# Altium footprint library laboE_altium.PcbLib: 676 footprints (part 26 of 43)
Each footprint in its own frame and in the unit in brackets; x right, y up, seen from the top. Pads: shape width x height; smd on the part's side, far side on the other; paste and mask are expansions set on the pad; w line width, h text height; cw(c..) or ccw(c..) is an arc to the next point about the centre after c.
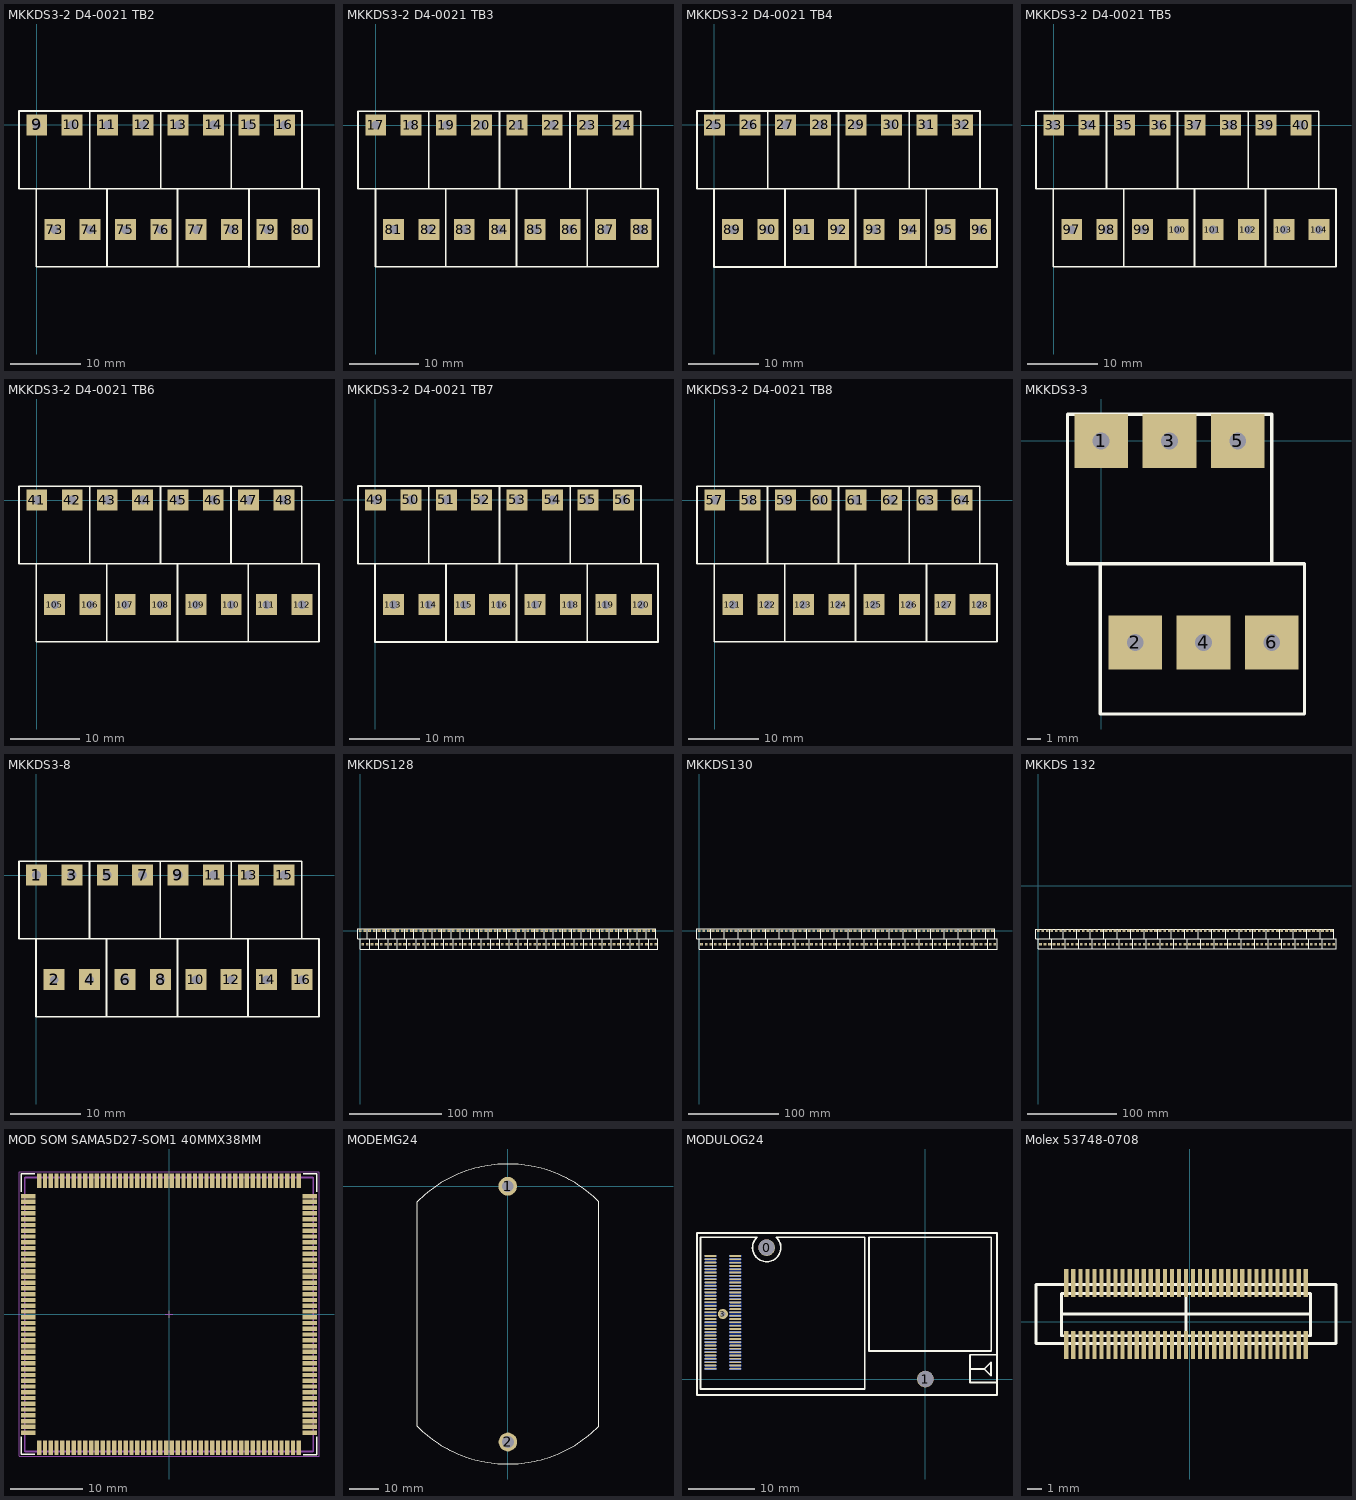
[diagram p25: the footprints below, top view; thin cyan lines are the x and y axes]

## MKKDS3-2 D4-0021 TB2 [mm]
pads (16):
  rect 3x3 hole 1.25: 9(0,0) 10(5.04,0) 11(10.12,0) 12(15.2,0) 13(20.24,0) 14(25.32,0) 15(30.4,0) 16(35.44,0) 73(2.58,-15) 74(7.62,-15) 75(12.7,-15) 76(17.78,-15) 77(22.82,-15) 78(27.9,-15) 79(32.98,-15) 80(37.966,-14.986)
Top Overlay:
  lines w0.254: -0.073,-9.144 -0.073,-20.32 20.167,-20.32 ; 7.58,-9.144 7.58,1.98 ; 10.047,-20.32 10.047,-9.144 ; 27.86,1.98 27.86,-9.144 40.407,-9.144 40.407,-20.32 35.367,-20.32 20.167,-20.32 ; 30.381,-20.334 30.381,-9.158 ; 32.94,-9.144 37.98,-9.144 37.98,1.98 32.94,1.98 17.74,1.98 ; 35.367,-9.144 17.74,-9.144 17.74,1.98 ; 17.74,1.98 -2.54,1.98 -2.54,-9.144 20.167,-9.144 20.167,-20.32

## MKKDS3-2 D4-0021 TB3 [mm]
pads (16):
  rect 3x3 hole 1.25: 17(0,0) 18(5.08,0) 19(10.12,0) 20(15.2,0) 21(20.28,0) 22(25.32,0) 23(30.4,0) 24(35.48,0) 81(2.58,-15) 82(7.66,-15) 83(12.7,-15) 84(17.78,-15) 85(22.86,-15) 86(27.9,-15) 87(32.98,-15) 88(38.06,-15)
Top Overlay:
  lines w0.254: -0.019,-9.158 -0.019,-20.334 10.047,-20.32 ; 10.047,-9.144 10.047,-20.32 ; 17.74,-9.144 17.74,1.98 -2.54,1.98 -2.54,-9.144 20.167,-9.144 ; 20.207,-20.32 20.207,-9.144 ; 22.82,-9.144 40.447,-9.144 ; 25.247,-9.144 7.62,-9.144 7.62,1.98 22.82,1.98 38.02,1.98 38.02,-9.144 ; 27.86,-9.144 27.86,1.98 ; 30.327,-20.32 30.327,-9.144 ; 40.447,-20.32 25.247,-20.32 10.047,-20.32 ; 40.487,-20.32 40.487,-9.144

## MKKDS3-2 D4-0021 TB4 [mm]
pads (16):
  rect 3x3 hole 1.25: 25(0,0) 26(5.08,0) 27(10.16,0) 28(15.2,0) 29(20.28,0) 30(25.36,0) 31(30.4,0) 32(35.48,0) 89(2.58,-15) 90(7.66,-15) 91(12.74,-15) 92(17.78,-15) 93(22.86,-15) 94(27.94,-15) 95(32.98,-15) 96(38.06,-15)
Top Overlay:
  lines w0.254: -0.073,-9.144 -0.073,-20.32 15.127,-20.32 30.327,-20.32 ; 7.62,-9.144 7.62,1.98 ; 10.087,-20.32 10.087,-9.144 ; 12.7,-9.144 30.327,-9.144 ; 15.127,-9.144 -2.5,-9.144 -2.5,1.98 12.7,1.98 27.9,1.98 ; 17.74,-9.144 17.74,1.98 ; 20.207,-20.32 20.207,-9.144 ; 38.02,-9.144 38.02,1.98 27.9,1.98 ; 27.9,-9.144 27.9,1.98 ; 27.9,-9.144 40.447,-9.144 40.447,-20.32 30.327,-20.32 ; 27.9,-9.144 27.9,1.98 ; 30.327,-20.32 30.327,-9.144 ; 30.327,-20.32 30.327,-9.144

## MKKDS3-2 D4-0021 TB5 [mm]
pads (16):
  rect 3x3 hole 1.25: 33(0,0) 34(5.04,0) 35(10.12,0) 36(15.2,0) 37(20.24,0) 38(25.32,0) 39(30.4,0) 40(35.44,0) 97(2.58,-15) 98(7.62,-15) 99(12.7,-15) 100(17.78,-15) 101(22.82,-15) 102(27.9,-15) 103(32.98,-15) 104(38.02,-15)
Top Overlay:
  lines w0.254: -0.073,-9.144 -0.073,-20.32 20.167,-20.32 ; 7.58,-9.144 7.58,1.98 ; 10.047,-20.32 10.047,-9.144 ; 27.86,-9.144 27.86,1.98 ; 30.327,-20.32 30.327,-9.144 ; 37.98,-9.144 37.98,1.98 17.74,1.98 ; 17.74,1.98 17.74,-9.144 40.447,-9.144 40.447,-20.32 20.167,-20.32 ; 17.74,1.98 -2.54,1.98 -2.54,-9.144 20.167,-9.144 20.167,-20.32

## MKKDS3-2 D4-0021 TB6 [mm]
pads (16):
  rect 3x3 hole 1.25: 41(0,0) 42(5.092,0) 43(10.12,0) 44(15.2,0) 45(20.28,0) 46(25.32,0) 47(30.4,0) 48(35.48,0) 105(2.58,-15) 106(7.66,-15) 107(12.7,-15) 108(17.78,-15) 109(22.86,-15) 110(27.9,-15) 111(32.98,-15) 112(38.06,-15)
Top Overlay:
  lines w0.254: -0.073,-9.144 -0.073,-20.32 20.167,-20.32 ; 17.74,-9.144 17.74,1.98 -2.54,1.98 -2.54,-9.144 20.167,-9.144 ; 20.207,-20.32 20.207,-9.144 ; 22.82,-9.144 40.447,-9.144 ; 25.247,-9.144 7.62,-9.144 ; 27.86,-9.144 27.86,1.98 ; 30.327,-20.32 30.327,-9.144 ; 38.02,-9.144 38.02,1.98 22.82,1.98 7.62,1.98 ; 40.447,-20.32 25.247,-20.32 10.047,-20.32 ; 40.487,-20.32 40.487,-9.144 ; 7.62,-9.144 7.62,1.98 ; 7.62,-9.144 7.62,1.98 ; 10.047,-20.32 10.047,-9.144 10.047,-20.32

## MKKDS3-2 D4-0021 TB7 [mm]
pads (16):
  rect 3x3 hole 1.25: 49(0,0) 50(5.08,0) 51(10.16,0) 52(15.2,0) 53(20.28,0) 54(25.36,0) 55(30.4,0) 56(35.48,0) 113(2.58,-15) 114(7.66,-15) 115(12.74,-15) 116(17.78,-15) 117(22.86,-15) 118(27.94,-15) 119(32.98,-15) 120(38.06,-15)
Top Overlay:
  lines w0.254: -0.073,-9.144 -0.073,-20.32 15.127,-20.32 30.327,-20.32 ; 7.62,-9.144 7.62,1.98 ; 10.087,-20.32 10.087,-9.144 ; 12.7,-9.144 30.327,-9.144 ; 15.127,-9.144 -2.5,-9.144 -2.5,1.98 27.9,1.98 ; 17.74,-9.144 17.74,1.98 ; 20.207,-20.32 20.207,-9.144 ; 38.02,-9.144 38.02,1.98 27.9,1.98 ; 27.9,-9.144 27.9,1.98 ; 27.9,-9.144 40.447,-9.144 40.447,-20.32 30.327,-20.32 ; 27.9,-9.144 27.9,1.98 ; 30.327,-20.32 30.327,-9.144 ; 30.327,-20.32 30.327,-9.144

## MKKDS3-2 D4-0021 TB8 [mm]
pads (16):
  rect 3x3 hole 1.25: 57(0,0) 58(5.04,0) 59(10.12,0) 60(15.2,0) 61(20.24,0) 62(25.32,0) 63(30.4,0) 64(35.44,0) 121(2.58,-15) 122(7.62,-15) 123(12.7,-15) 124(17.78,-15) 125(22.82,-15) 126(27.9,-15) 127(32.98,-15) 128(38.02,-15)
Top Overlay:
  lines w0.254: -0.073,-9.144 -0.073,-20.32 20.167,-20.32 ; 7.58,-9.144 7.58,1.98 ; 10.047,-20.32 10.047,-9.144 ; 27.86,-9.144 27.86,1.98 ; 30.327,-20.32 30.327,-9.144 ; 32.94,-9.144 40.447,-9.144 40.447,-20.32 20.167,-20.32 ; 35.367,-9.144 17.74,-9.144 17.74,1.98 ; 37.98,-9.144 37.98,1.98 32.94,1.98 17.74,1.98 ; 17.74,1.98 -2.54,1.98 -2.54,-9.144 20.167,-9.144 20.167,-20.32

## MKKDS3-3 [mm] "Bornera doble de 3x3"
pads (6):
  rect 4x4 hole 1.25: 1(0,0) 2(2.54,-15) 3(5.08,0) 4(7.62,-15) 5(10.16,0) 6(12.7,-15)
Top Overlay:
  lines w0.254: -0.073,-9.144 -0.073,-20.32 15.127,-20.32 15.127,-9.144 -2.5,-9.144 -2.5,1.98 12.7,1.98 12.7,-9.144

## MKKDS3-8 [mm]
pads (16):
  rect 3x3 hole 1.25: 1(0,0) 2(2.54,-15) 3(5.08,0) 4(7.62,-15) 5(10.16,0) 6(12.7,-15) 7(15.2,0) 8(17.78,-15) 9(20.28,0) 10(22.86,-15) 11(25.36,0) 12(27.9,-15) 13(30.4,0) 14(32.98,-15) 15(35.48,0) 16(38.06,-15)
Top Overlay:
  lines w0.254: -0.073,-9.144 -0.073,-20.32 15.127,-20.32 30.327,-20.32 ; 7.62,-9.144 7.62,1.98 ; 10.047,-20.32 10.047,-9.144 ; 12.7,-9.144 30.327,-9.144 30.327,-20.32 ; 15.127,-9.144 -2.5,-9.144 -2.5,1.98 12.7,1.98 27.9,1.98 ; 17.74,-9.144 17.74,1.98 ; 20.207,-20.32 20.207,-9.144 ; 38.02,-9.144 38.02,1.98 27.9,1.98 ; 27.9,1.98 27.9,-9.144 40.487,-9.144 40.487,-20.32 30.327,-20.32

## MKKDS128 [mm]
pads (128):
  rect 3x3 hole 1.25: 1(0,0) 2(5.08,0) 3(10.16,0) 4(15.2,0) 5(20.28,0) 6(25.36,0) 7(30.4,0) 8(35.48,0) 9(40.56,0) 10(45.6,0) 11(50.68,0) 12(55.76,0) 13(60.8,0) 14(65.88,0) 15(70.96,0) 16(76,0) 17(81.08,0) 18(86.16,0) 19(91.2,0) 20(96.28,0) 21(101.36,0) 22(106.4,0) 23(111.48,0) 24(116.56,0) 25(121.6,0) 26(126.68,0) 27(131.76,0) 28(136.8,0) 29(141.88,0) 30(146.96,0) 31(152,0) 32(157.08,0) 33(162.16,0) 34(167.2,0) 35(172.28,0) 36(177.36,0) 37(182.4,0) 38(187.48,0) 39(192.56,0) 40(197.6,0) 41(202.68,0) 42(207.772,0) 43(212.8,0) 44(217.88,0) 45(222.96,0) 46(228,0) 47(233.08,0) 48(238.16,0) 49(243.2,0) 50(248.28,0) 51(253.36,0) 52(258.4,0) 53(263.48,0) 54(268.56,0) 55(273.6,0) 56(278.68,0) 57(283.76,0) 58(288.8,0) 59(293.88,0) 60(298.96,0) 61(304,0) 62(309.08,0) 63(314.16,0) 64(319.2,0) 65(2.54,-15) 66(7.62,-15) 67(12.7,-15) 68(17.78,-15) 69(22.86,-15) 70(27.9,-15) 71(32.98,-15) 72(38.06,-15) 73(43.14,-15) 74(48.18,-15) 75(53.26,-15) 76(58.34,-15) 77(63.38,-15) 78(68.46,-15) 79(73.54,-15) 80(78.526,-14.986) 81(83.66,-15) 82(88.74,-15) 83(93.78,-15) 84(98.86,-15) 85(103.94,-15) 86(108.98,-15) 87(114.06,-15) 88(119.14,-15) 89(124.18,-15) 90(129.26,-15) 91(134.34,-15) 92(139.38,-15) 93(144.46,-15) 94(149.54,-15) 95(154.58,-15) 96(159.66,-15) 97(164.74,-15) 98(169.78,-15) 99(174.86,-15) 100(179.94,-15) 101(184.98,-15) 102(190.06,-15) 103(195.14,-15) 104(200.18,-15) 105(205.26,-15) 106(210.34,-15) 107(215.38,-15) 108(220.46,-15) 109(225.54,-15) 110(230.58,-15) 111(235.66,-15) 112(240.74,-15) 113(245.78,-15) 114(250.86,-15) 115(255.94,-15) 116(260.98,-15) 117(266.06,-15) 118(271.14,-15) 119(276.18,-15) 120(281.26,-15) 121(286.34,-15) 122(291.38,-15) 123(296.46,-15) 124(301.54,-15) 125(306.58,-15) 126(311.66,-15) 127(316.74,-15) 128(321.78,-15)
Top Overlay:
  lines w0.254: -0.073,-9.144 -0.073,-20.32 15.127,-20.32 30.327,-20.32 ; 7.62,-9.144 7.62,1.98 ; 10.047,-20.32 10.047,-9.144 ; 12.7,-9.144 30.327,-9.144 30.327,-20.32 ; 15.127,-9.144 -2.5,-9.144 -2.5,1.98 12.7,1.98 27.9,1.98 ; 17.74,-9.144 17.74,1.98 ; 20.207,-20.32 20.207,-9.144 ; 38.02,-9.144 38.02,1.98 ; 40.487,-20.32 40.487,-9.144 ; 43.1,-9.144 60.727,-9.144 60.727,-20.32 ; 45.527,-9.144 27.9,-9.144 27.9,1.98 ; 48.14,-9.144 48.14,1.98 ; 50.607,-20.32 50.607,-9.144 ; 68.42,-9.144 68.42,1.98 ; 70.941,-20.334 70.941,-9.158 ; 73.5,-9.144 91.127,-9.144 91.127,-20.32 ; 75.927,-9.144 58.3,-9.144 58.3,1.98 ; 78.54,-9.144 78.54,1.98 ; 81.061,-20.334 81.061,-9.158 ; 98.82,-9.144 98.82,1.98 ; 101.287,-20.32 101.287,-9.144 ; 103.9,-9.144 121.527,-9.144 121.527,-20.32 ; 106.327,-9.144 88.7,-9.144 88.7,1.98 ; 108.94,-9.144 108.94,1.98 ; 111.407,-20.32 111.407,-9.144 ; 129.22,-9.144 129.22,1.98 ; 131.687,-20.32 131.687,-9.144 ; 134.3,-9.144 151.927,-9.144 ; 136.727,-9.144 119.1,-9.144 119.1,1.98 ; 139.34,-9.144 139.34,1.98 ; 141.807,-20.32 141.807,-9.144 ; 159.62,-9.144 159.62,1.98 ; 162.087,-20.32 162.087,-9.144 ; 164.7,-9.144 182.327,-9.144 182.327,-20.32 ; 167.127,-9.144 149.5,-9.144 ; 169.74,-9.144 169.74,1.98 ; 172.207,-20.32 172.207,-9.144 ; 190.02,-9.144 190.02,1.98 ; 192.487,-20.32 192.487,-9.144 ; 195.1,-9.144 212.727,-9.144 ; 197.527,-9.144 179.9,-9.144 179.9,1.98 ; 200.14,-9.144 200.14,1.98 ; 202.607,-20.32 202.607,-9.144 ; 220.42,-9.144 220.42,1.98 ; 222.887,-20.32 222.887,-9.144 ; 225.5,-9.144 243.127,-9.144 243.127,-20.32 ; 227.927,-9.144 210.3,-9.144 ; 230.54,-9.144 230.54,1.98 ; 233.007,-20.32 233.007,-9.144 ; 250.82,-9.144 250.82,1.98 ; 253.287,-20.32 253.287,-9.144 ; 255.9,-9.144 273.527,-9.144 ; 258.327,-9.144 240.7,-9.144 240.7,1.98 ; 260.94,-9.144 260.94,1.98 ; 263.407,-20.32 263.407,-9.144 ; 281.22,-9.144 281.22,1.98 ; 283.687,-20.32 283.687,-9.144 ; 286.3,-9.144 303.927,-9.144 303.927,-20.32 ; 288.727,-9.144 271.1,-9.144 ; 291.34,-9.144 291.34,1.98 ; 293.807,-20.32 293.807,-9.144 ; 311.62,-9.144 311.62,1.98 ; 314.087,-20.32 314.087,-9.144 ; 316.7,-9.144 324.207,-9.144 324.207,-20.32 303.927,-20.32 ; 319.127,-9.144 301.5,-9.144 301.5,1.98 ; 321.74,-9.144 321.74,1.98 316.7,1.98 301.5,1.98 ; 27.9,1.98 43.1,1.98 58.3,1.98 ; 30.327,-20.32 45.527,-20.32 60.727,-20.32 ; 58.3,1.98 73.5,1.98 88.7,1.98 ; 60.727,-20.32 75.927,-20.32 91.127,-20.32 ; 88.7,1.98 103.9,1.98 119.1,1.98 ; 91.127,-20.32 106.327,-20.32 121.527,-20.32 ; 119.1,1.98 134.3,1.98 149.5,1.98 ; 121.527,-20.32 136.727,-20.32 151.927,-20.32 ; 149.5,-9.144 149.5,1.98 ; 149.5,-9.144 149.5,1.98 ; 149.5,1.98 164.7,1.98 179.9,1.98 ; 151.927,-20.32 167.127,-20.32 182.327,-20.32 ; 151.927,-20.32 151.927,-9.144 ; 151.927,-20.32 151.927,-9.144 ; 179.9,1.98 195.1,1.98 210.3,1.98 ; 182.327,-20.32 197.527,-20.32 212.727,-20.32 ; 210.3,-9.144 210.3,1.98 ; 210.3,-9.144 210.3,1.98 ; 210.3,1.98 225.5,1.98 240.7,1.98 ; 212.727,-20.32 227.927,-20.32 243.127,-20.32 ; 212.727,-20.32 212.727,-9.144 ; 212.727,-20.32 212.727,-9.144 ; 240.7,1.98 255.9,1.98 271.1,1.98 ; 243.127,-20.32 258.327,-20.32 273.527,-20.32 ; 271.1,-9.144 271.1,1.98 ; 271.1,-9.144 271.1,1.98 ; 271.1,1.98 286.3,1.98 301.5,1.98 ; 273.527,-20.32 288.727,-20.32 303.927,-20.32 ; 273.527,-20.32 273.527,-9.144 ; 273.527,-20.32 273.527,-9.144

## MKKDS130 [mm]
pads (130):
  rect 3x3 hole 1.25: 1(0,0) 2(5.08,0) 3(10.16,0) 4(15.2,0) 5(20.28,0) 6(25.36,0) 7(30.4,0) 8(35.48,0) 9(40.56,0) 10(45.6,0) 11(50.68,0) 12(55.76,0) 13(60.8,0) 14(65.88,0) 15(70.96,0) 16(76,0) 17(81.08,0) 18(86.16,0) 19(91.2,0) 20(96.28,0) 21(101.36,0) 22(106.4,0) 23(111.48,0) 24(116.56,0) 25(121.6,0) 26(126.68,0) 27(131.76,0) 28(136.8,0) 29(141.88,0) 30(146.96,0) 31(152,0) 32(157.08,0) 33(162.16,0) 34(167.2,0) 35(172.28,0) 36(177.36,0) 37(182.4,0) 38(187.48,0) 39(192.56,0) 40(197.6,0) 41(202.68,0) 42(207.772,0) 43(212.8,0) 44(217.88,0) 45(222.96,0) 46(228,0) 47(233.08,0) 48(238.16,0) 49(243.2,0) 50(248.28,0) 51(253.36,0) 52(258.4,0) 53(263.48,0) 54(268.56,0) 55(273.6,0) 56(278.68,0) 57(283.76,0) 58(288.8,0) 59(293.88,0) 60(298.96,0) 61(304,0) 62(309.08,0) 63(314.16,0) 64(319.2,0) 65(324.28,0) 66(2.54,-15) 67(7.62,-15) 68(12.7,-15) 69(17.78,-15) 70(22.82,-15) 71(27.9,-15) 72(32.98,-15) 73(38.06,-15) 74(43.1,-15) 75(48.18,-15) 76(53.26,-15) 77(58.3,-15) 78(63.38,-15) 79(68.46,-15) 80(73.446,-14.986) 81(78.58,-15) 82(83.66,-15) 83(88.7,-15) 84(93.78,-15) 85(98.86,-15) 86(103.9,-15) 87(108.98,-15) 88(114.06,-15) 89(119.1,-15) 90(124.18,-15) 91(129.26,-15) 92(134.3,-15) 93(139.38,-15) 94(144.46,-15) 95(149.5,-15) 96(154.58,-15) 97(159.66,-15) 98(164.7,-15) 99(169.78,-15) 100(174.86,-15) 101(179.9,-15) 102(184.98,-15) 103(190.06,-15) 104(195.1,-15) 105(200.18,-15) 106(205.26,-15) 107(210.3,-15) 108(215.38,-15) 109(220.46,-15) 110(225.5,-15) 111(230.58,-15) 112(235.66,-15) 113(240.7,-15) 114(245.78,-15) 115(250.86,-15) 116(255.9,-15) 117(260.98,-15) 118(266.06,-15) 119(271.1,-15) 120(276.18,-15) 121(281.26,-15) 122(286.3,-15) 123(291.38,-15) 124(296.46,-15) 125(301.5,-15) 126(306.58,-15) 127(311.66,-15) 128(316.7,-15) 129(321.78,-15) 130(326.86,-15)
Top Overlay:
  lines w0.254: -0.073,-9.144 -0.073,-20.32 15.127,-20.32 ; 326.82,-9.144 326.82,1.98 316.7,1.98 ; 12.7,1.98 12.7,-9.144 30.327,-9.144 30.327,-20.32 ; 12.7,1.98 -2.5,1.98 -2.5,-9.144 15.127,-9.144 15.127,-20.32 ; 12.7,1.98 27.9,1.98 ; 15.127,-20.32 30.327,-20.32 ; 27.9,1.98 27.9,-9.144 45.527,-9.144 45.527,-20.32 ; 27.9,1.98 43.1,1.98 ; 30.327,-20.32 45.527,-20.32 ; 43.1,1.98 43.1,-9.144 60.727,-9.144 60.727,-20.32 ; 43.1,1.98 58.3,1.98 ; 45.527,-20.32 60.727,-20.32 ; 58.3,1.98 58.3,-9.144 75.927,-9.144 75.927,-20.32 ; 58.3,1.98 73.5,1.98 ; 60.727,-20.32 75.927,-20.32 ; 73.5,1.98 73.5,-9.144 91.127,-9.144 91.127,-20.32 ; 73.5,1.98 88.7,1.98 ; 75.927,-20.32 91.127,-20.32 ; 88.7,1.98 88.7,-9.144 106.327,-9.144 106.327,-20.32 ; 88.7,1.98 103.9,1.98 ; 91.127,-20.32 106.327,-20.32 ; 103.9,1.98 103.9,-9.144 121.527,-9.144 121.527,-20.32 ; 103.9,1.98 119.1,1.98 ; 106.327,-20.32 121.527,-20.32 ; 119.1,1.98 119.1,-9.144 136.727,-9.144 ; 119.1,1.98 134.3,1.98 ; 121.527,-20.32 136.727,-20.32 ; 134.3,-9.144 134.3,1.98 ; 134.3,-9.144 151.927,-9.144 ; 134.3,-9.144 134.3,1.98 ; 134.3,1.98 149.5,1.98 ; 136.727,-20.32 151.927,-20.32 ; 136.727,-20.32 136.727,-9.144 ; 136.727,-20.32 136.727,-9.144 ; 149.5,-9.144 149.5,1.98 ; 149.5,-9.144 167.127,-9.144 ; 149.5,-9.144 149.5,1.98 ; 149.5,1.98 164.7,1.98 ; 151.927,-20.32 167.127,-20.32 ; 151.927,-20.32 151.927,-9.144 ; 151.927,-20.32 151.927,-9.144 ; 164.7,-9.144 164.7,1.98 ; 164.7,-9.144 182.327,-9.144 182.327,-20.32 ; 164.7,-9.144 164.7,1.98 ; 164.7,1.98 179.9,1.98 ; 167.127,-20.32 182.327,-20.32 ; 167.127,-20.32 167.127,-9.144 ; 167.127,-20.32 167.127,-9.144 ; 179.9,1.98 179.9,-9.144 197.527,-9.144 ; 179.9,1.98 195.1,1.98 ; 182.327,-20.32 197.527,-20.32 ; 195.1,-9.144 195.1,1.98 ; 195.1,-9.144 212.727,-9.144 ; 195.1,-9.144 195.1,1.98 ; 195.1,1.98 210.3,1.98 ; 197.527,-20.32 212.727,-20.32 ; 197.527,-20.32 197.527,-9.144 ; 197.527,-20.32 197.527,-9.144 ; 210.3,-9.144 210.3,1.98 ; 210.3,-9.144 227.927,-9.144 ; 210.3,-9.144 210.3,1.98 ; 210.3,1.98 225.5,1.98 ; 212.727,-20.32 227.927,-20.32 ; 212.727,-20.32 212.727,-9.144 ; 212.727,-20.32 212.727,-9.144 ; 225.5,-9.144 225.5,1.98 ; 225.5,-9.144 243.127,-9.144 243.127,-20.32 ; 225.5,-9.144 225.5,1.98 ; 225.5,1.98 240.7,1.98 ; 227.927,-20.32 243.127,-20.32 ; 227.927,-20.32 227.927,-9.144 ; 227.927,-20.32 227.927,-9.144 ; 240.7,1.98 240.7,-9.144 258.327,-9.144 ; 240.7,1.98 255.9,1.98 ; 243.127,-20.32 258.327,-20.32 ; 255.9,-9.144 255.9,1.98 ; 255.9,-9.144 273.527,-9.144 ; 255.9,-9.144 255.9,1.98 ; 255.9,1.98 271.1,1.98 ; 258.327,-20.32 273.527,-20.32 ; 258.327,-20.32 258.327,-9.144 ; 258.327,-20.32 258.327,-9.144 ; 271.1,-9.144 271.1,1.98 ; 271.1,-9.144 288.727,-9.144 ; 271.1,-9.144 271.1,1.98 ; 271.1,1.98 286.3,1.98 ; 273.527,-20.32 288.727,-20.32 ; 273.527,-20.32 273.527,-9.144 ; 273.527,-20.32 273.527,-9.144 ; 286.3,-9.144 286.3,1.98 ; 286.3,-9.144 303.927,-9.144 303.927,-20.32 ; 286.3,-9.144 286.3,1.98 ; 286.3,1.98 301.5,1.98 ; 288.727,-20.32 303.927,-20.32 ; 288.727,-20.32 288.727,-9.144 ; 288.727,-20.32 288.727,-9.144 ; 301.5,1.98 301.5,-9.144 319.127,-9.144 ; 301.5,1.98 316.7,1.98 ; 303.927,-20.32 319.127,-20.32 ; 316.7,-9.144 316.7,1.98 ; 316.7,-9.144 329.247,-9.144 329.247,-20.32 319.127,-20.32 ; 316.7,-9.144 316.7,1.98 ; 319.127,-20.32 319.127,-9.144 ; 319.127,-20.32 319.127,-9.144

## MKKDS 132 [mm]
pads (132):
  rect 3x3 hole 1.25: 1(0,-50.8) 2(5.08,-50.8) 3(10.16,-50.8) 4(15.2,-50.8) 5(20.28,-50.8) 6(25.36,-50.8) 7(30.4,-50.8) 8(35.48,-50.8) 9(40.56,-50.8) 10(45.6,-50.8) 11(50.68,-50.8) 12(55.76,-50.8) 13(60.8,-50.8) 14(65.88,-50.8) 15(70.96,-50.8) 16(76,-50.8) 17(81.08,-50.8) 18(86.16,-50.8) 19(91.2,-50.8) 20(96.28,-50.8) 21(101.36,-50.8) 22(106.4,-50.8) 23(111.48,-50.8) 24(116.56,-50.8) 25(121.6,-50.8) 26(126.68,-50.8) 27(131.76,-50.8) 28(136.8,-50.8) 29(141.88,-50.8) 30(146.96,-50.8) 31(152,-50.8) 32(157.08,-50.8) 33(162.16,-50.8) 34(167.2,-50.8) 35(172.28,-50.8) 36(177.36,-50.8) 37(182.4,-50.8) 38(187.48,-50.8) 39(192.56,-50.8) 40(197.6,-50.8) 41(202.68,-50.8) 42(207.772,-50.8) 43(212.8,-50.8) 44(217.88,-50.8) 45(222.96,-50.8) 46(228,-50.8) 47(233.08,-50.8) 48(238.16,-50.8) 49(243.2,-50.8) 50(248.28,-50.8) 51(253.36,-50.8) 52(258.4,-50.8) 53(263.48,-50.8) 54(268.56,-50.8) 55(273.6,-50.8) 56(278.68,-50.8) 57(283.76,-50.8) 58(288.8,-50.8) 59(293.88,-50.8) 60(298.96,-50.8) 61(304,-50.8) 62(309.08,-50.8) 63(314.16,-50.8) 64(319.2,-50.8) 65(324.28,-50.8) 66(329.36,-50.8) 67(2.54,-65.8) 68(7.62,-65.8) 69(12.7,-65.8) 70(17.74,-65.8) 71(22.82,-65.8) 72(27.9,-65.8) 73(32.98,-65.8) 74(38.02,-65.8) 75(43.1,-65.8) 76(48.18,-65.8) 77(53.22,-65.8) 78(58.3,-65.8) 79(63.38,-65.8) 80(68.366,-65.786) 81(73.5,-65.8) 82(78.58,-65.8) 83(83.62,-65.8) 84(88.7,-65.8) 85(93.78,-65.8) 86(98.82,-65.8) 87(103.9,-65.8) 88(108.98,-65.8) 89(114.02,-65.8) 90(119.1,-65.8) 91(124.18,-65.8) 92(129.22,-65.8) 93(134.3,-65.8) 94(139.38,-65.8) 95(144.42,-65.8) 96(149.5,-65.8) 97(154.58,-65.8) 98(159.62,-65.8) 99(164.7,-65.8) 100(169.78,-65.8) 101(174.82,-65.8) 102(179.9,-65.8) 103(184.98,-65.8) 104(190.02,-65.8) 105(195.1,-65.8) 106(200.18,-65.8) 107(205.22,-65.8) 108(210.3,-65.8) 109(215.38,-65.8) 110(220.42,-65.8) 111(225.5,-65.8) 112(230.58,-65.8) 113(235.62,-65.8) 114(240.7,-65.8) 115(245.78,-65.8) 116(250.82,-65.8) 117(255.9,-65.8) 118(260.98,-65.8) 119(266.02,-65.8) 120(271.1,-65.8) 121(276.18,-65.8) 122(281.22,-65.8) 123(286.3,-65.8) 124(291.38,-65.8) 125(296.42,-65.8) 126(301.5,-65.8) 127(306.58,-65.8) 128(311.62,-65.8) 129(316.7,-65.8) 130(321.78,-65.8) 131(326.82,-65.8) 132(331.9,-65.8)
Top Overlay:
  lines w0.254: -0.073,-59.944 -0.073,-71.12 15.127,-71.12 ; 12.7,-48.82 12.7,-59.944 30.327,-59.944 30.327,-71.12 ; 12.7,-48.82 -2.5,-48.82 -2.5,-59.944 15.127,-59.944 15.127,-71.12 ; 12.7,-48.82 27.9,-48.82 ; 15.127,-71.12 30.327,-71.12 ; 27.9,-48.82 27.9,-59.944 45.527,-59.944 45.527,-71.12 ; 27.9,-48.82 43.1,-48.82 ; 30.327,-71.12 45.527,-71.12 ; 43.1,-48.82 43.1,-59.944 60.727,-59.944 60.727,-71.12 ; 43.1,-48.82 58.3,-48.82 ; 45.527,-71.12 60.727,-71.12 ; 58.3,-48.82 58.3,-59.944 75.927,-59.944 75.927,-71.12 ; 58.3,-48.82 73.5,-48.82 ; 60.727,-71.12 75.927,-71.12 ; 73.5,-48.82 73.5,-59.944 91.127,-59.944 91.127,-71.12 ; 73.5,-48.82 88.7,-48.82 ; 75.927,-71.12 91.127,-71.12 ; 88.7,-48.82 88.7,-59.944 106.327,-59.944 106.327,-71.12 ; 88.7,-48.82 103.9,-48.82 ; 91.127,-71.12 106.327,-71.12 ; 103.9,-48.82 103.9,-59.944 121.527,-59.944 121.527,-71.12 ; 103.9,-48.82 119.1,-48.82 ; 106.327,-71.12 121.527,-71.12 ; 119.1,-48.82 119.1,-59.944 136.727,-59.944 ; 119.1,-48.82 134.3,-48.82 ; 121.527,-71.12 136.727,-71.12 ; 134.3,-59.944 134.3,-48.82 ; 134.3,-59.944 151.927,-59.944 ; 134.3,-59.944 134.3,-48.82 ; 134.3,-48.82 149.5,-48.82 ; 136.727,-71.12 151.927,-71.12 ; 136.727,-71.12 136.727,-59.944 ; 136.727,-71.12 136.727,-59.944 ; 149.5,-59.944 149.5,-48.82 ; 149.5,-59.944 167.127,-59.944 ; 149.5,-59.944 149.5,-48.82 ; 149.5,-48.82 164.7,-48.82 ; 151.927,-71.12 167.127,-71.12 ; 151.927,-71.12 151.927,-59.944 ; 151.927,-71.12 151.927,-59.944 ; 164.7,-59.944 164.7,-48.82 ; 164.7,-59.944 182.327,-59.944 182.327,-71.12 ; 164.7,-59.944 164.7,-48.82 ; 164.7,-48.82 179.9,-48.82 ; 167.127,-71.12 182.327,-71.12 ; 167.127,-71.12 167.127,-59.944 ; 167.127,-71.12 167.127,-59.944 ; 179.9,-48.82 179.9,-59.944 197.527,-59.944 ; 179.9,-48.82 195.1,-48.82 ; 182.327,-71.12 197.527,-71.12 ; 195.1,-59.944 195.1,-48.82 ; 195.1,-59.944 212.727,-59.944 ; 195.1,-59.944 195.1,-48.82 ; 195.1,-48.82 210.3,-48.82 ; 197.527,-71.12 212.727,-71.12 ; 197.527,-71.12 197.527,-59.944 ; 197.527,-71.12 197.527,-59.944 ; 210.3,-59.944 210.3,-48.82 ; 210.3,-59.944 227.927,-59.944 ; 210.3,-59.944 210.3,-48.82 ; 210.3,-48.82 225.5,-48.82 ; 212.727,-71.12 227.927,-71.12 ; 212.727,-71.12 212.727,-59.944 ; 212.727,-71.12 212.727,-59.944 ; 225.5,-59.944 225.5,-48.82 ; 225.5,-59.944 243.127,-59.944 243.127,-71.12 ; 225.5,-59.944 225.5,-48.82 ; 225.5,-48.82 240.7,-48.82 ; 227.927,-71.12 243.127,-71.12 ; 227.927,-71.12 227.927,-59.944 ; 227.927,-71.12 227.927,-59.944 ; 240.7,-48.82 240.7,-59.944 258.327,-59.944 ; 240.7,-48.82 255.9,-48.82 ; 243.127,-71.12 258.327,-71.12 ; 255.9,-59.944 255.9,-48.82 ; 255.9,-59.944 273.527,-59.944 ; 255.9,-59.944 255.9,-48.82 ; 255.9,-48.82 271.1,-48.82 ; 258.327,-71.12 273.527,-71.12 ; 258.327,-71.12 258.327,-59.944 ; 258.327,-71.12 258.327,-59.944 ; 271.1,-59.944 271.1,-48.82 ; 271.1,-59.944 288.727,-59.944 ; 271.1,-59.944 271.1,-48.82 ; 271.1,-48.82 286.3,-48.82 ; 273.527,-71.12 288.727,-71.12 ; 273.527,-71.12 273.527,-59.944 ; 273.527,-71.12 273.527,-59.944 ; 286.3,-59.944 286.3,-48.82 ; 286.3,-59.944 303.927,-59.944 303.927,-71.12 ; 286.3,-59.944 286.3,-48.82 ; 286.3,-48.82 301.5,-48.82 ; 288.727,-71.12 303.927,-71.12 ; 288.727,-71.12 288.727,-59.944 ; 288.727,-71.12 288.727,-59.944 ; 301.5,-48.82 301.5,-59.944 319.127,-59.944 ; 301.5,-48.82 316.7,-48.82 ; 303.927,-71.12 319.127,-71.12 ; 316.7,-59.944 316.7,-48.82 ; 316.7,-59.944 334.327,-59.944 ; 316.7,-59.944 316.7,-48.82 ; 316.7,-48.82 331.9,-48.82 ; 319.127,-71.12 334.327,-71.12 ; 319.127,-71.12 319.127,-59.944 ; 319.127,-71.12 319.127,-59.944 ; 331.9,-48.82 331.9,-59.944 331.9,-48.82 ; 334.327,-71.12 334.327,-59.944 ; 334.327,-71.12 334.327,-59.944

## MOD SOM SAMA5D27-SOM1 40MMX38MM [mm]
pads (176):
  rect 2x0.6 smd paste-0.025 mask-1: 1(-19.5,16.4) 2(-19.5,15.6) 3(-19.5,14.8) 4(-19.5,14) 5(-19.5,13.2) 6(-19.5,12.4) 7(-19.5,11.6) 8(-19.5,10.8) 9(-19.5,10) 10(-19.5,9.2) 11(-19.5,8.4) 12(-19.5,7.6) 13(-19.5,6.8) 14(-19.5,6) 15(-19.5,5.2) 16(-19.5,4.4) 17(-19.5,3.6) 18(-19.5,2.8) 19(-19.5,2) 20(-19.5,1.2) 21(-19.5,0.4) 22(-19.5,-0.4) 23(-19.5,-1.2) 24(-19.5,-2) 25(-19.5,-2.8) 26(-19.5,-3.6) 27(-19.5,-4.4) 28(-19.5,-5.2) 29(-19.5,-6) 30(-19.5,-6.8) 31(-19.5,-7.6) 32(-19.5,-8.4) 33(-19.5,-9.2) 34(-19.5,-10) 35(-19.5,-10.8) 36(-19.5,-11.6) 37(-19.5,-12.4) 38(-19.5,-13.2) 39(-19.5,-14) 40(-19.5,-14.8) 41(-19.5,-15.6) 42(-19.5,-16.4) 89(19.5,-16.4) 90(19.5,-15.6) 91(19.5,-14.8) 92(19.5,-14) 93(19.5,-13.2) 94(19.5,-12.4) 95(19.5,-11.6) 96(19.5,-10.8) 97(19.5,-10) 98(19.5,-9.2) 99(19.5,-8.4) 100(19.5,-7.6) 101(19.5,-6.8) 102(19.5,-6) 103(19.5,-5.2) 104(19.5,-4.4) 105(19.5,-3.6) 106(19.5,-2.8) 107(19.5,-2) 108(19.5,-1.2) 109(19.5,-0.4) 110(19.5,0.4) 111(19.5,1.2) 112(19.5,2) 113(19.5,2.8) 114(19.5,3.6) 115(19.5,4.4) 116(19.5,5.2) 117(19.5,6) 118(19.5,6.8) 119(19.5,7.6) 120(19.5,8.4) 121(19.5,9.2) 122(19.5,10) 123(19.5,10.8) 124(19.5,11.6) 125(19.5,12.4) 126(19.5,13.2) 127(19.5,14) 128(19.5,14.8) 129(19.5,15.6) 130(19.5,16.4)
  rect 0.6x2 smd paste-0.025 mask-1: 43(-18,-18.5) 44(-17.2,-18.5) 45(-16.4,-18.5) 46(-15.6,-18.5) 47(-14.8,-18.5) 48(-14,-18.5) 49(-13.2,-18.5) 50(-12.4,-18.5) 51(-11.6,-18.5) 52(-10.8,-18.5) 53(-10,-18.5) 54(-9.2,-18.5) 55(-8.4,-18.5) 56(-7.6,-18.5) 57(-6.8,-18.5) 58(-6,-18.5) 59(-5.2,-18.5) 60(-4.4,-18.5) 61(-3.6,-18.5) 62(-2.8,-18.5) 63(-2,-18.5) 64(-1.2,-18.5) 65(-0.4,-18.5) 66(0.4,-18.5) 67(1.2,-18.5) 68(2,-18.5) 69(2.8,-18.5) 70(3.6,-18.5) 71(4.4,-18.5) 72(5.2,-18.5) 73(6,-18.5) 74(6.8,-18.5) 75(7.6,-18.5) 76(8.4,-18.5) 77(9.2,-18.5) 78(10,-18.5) 79(10.8,-18.5) 80(11.6,-18.5) 81(12.4,-18.5) 82(13.2,-18.5) 83(14,-18.5) 84(14.8,-18.5) 85(15.6,-18.5) 86(16.4,-18.5) 87(17.2,-18.5) 88(18,-18.5) 131(18,18.5) 132(17.2,18.5) 133(16.4,18.5) 134(15.6,18.5) 135(14.8,18.5) 136(14,18.5) 137(13.2,18.5) 138(12.4,18.5) 139(11.6,18.5) 140(10.8,18.5) 141(10,18.5) 142(9.2,18.5) 143(8.4,18.5) 144(7.6,18.5) 145(6.8,18.5) 146(6,18.5) 147(5.2,18.5) 148(4.4,18.5) 149(3.6,18.5) 150(2.8,18.5) 151(2,18.5) 152(1.2,18.5) 153(0.4,18.5) 154(-0.4,18.5) 155(-1.2,18.5) 156(-2,18.5) 157(-2.8,18.5) 158(-3.6,18.5) 159(-4.4,18.5) 160(-5.2,18.5) 161(-6,18.5) 162(-6.8,18.5) 163(-7.6,18.5) 164(-8.4,18.5) 165(-9.2,18.5) 166(-10,18.5) 167(-10.8,18.5) 168(-11.6,18.5) 169(-12.4,18.5) 170(-13.2,18.5) 171(-14,18.5) 172(-14.8,18.5) 173(-15.6,18.5) 174(-16.4,18.5) 175(-17.2,18.5) 176(-18,18.5)
Top Overlay:
  lines w0.2: -20.5,-17 -20.5,-19.4 -18.6,-19.4 ; -20.5,17 -20.5,19.5 -18.6,19.5 ; 18.6,-19.5 20.5,-19.5 20.5,-17 ; 18.6,19.5 20.5,19.5 20.5,17
  text "." at -21.7,18.6 h1
Top Solder:
  drawing of 176 lines, arcs and shapes, not listed
Mechanical 11:
  lines w0.254: -20,-19 -20,19 20,19 20,-19 -20,-19
  text "1" at -20.2,16.5 h1
Mechanical 15:
  lines w0.1: -0.5,0 0.5,0 ; 0,-0.5 0,0.5 ; -20.8,-19.7 20.8,-19.7 20.8,19.8 -20.8,19.8 -20.8,-19.7
3D body: height 1.2, standoff 0.8, extent -1.1,-10.2 12.6,3.5
3D body: height 1.2, standoff 0.8, extent -13.6,-12.6 -9.8,-8.9
3D body: height 1.2, standoff 0.8, extent -6.95,13.05 -5.45,14.55
3D body: height 1.2, standoff 0.8, extent -12.7,10.1 -9.7,13.1
3D body: height 1.2, standoff 0.8, extent 6.4,7.45 12,12.35
3D body: height 1, standoff 0, extent -20,-19 20,19

## MODEMG24 [mm]
pads (2):
  round 6.35 hole 4: 1(0,0) 2(0.064,-86.988)
Top Overlay:
  lines w0.254: -30.788,-5.239 -30.81,-81.679 ccw(c0.081,-50.782) 30.978,-81.673 31,-5.232 ; -30.788,-5.239 cw(c0.109,-36.13) 31,-5.233

## MODULOG24 [mm]
pads (144):
  round 0.254 on Top Overlay: 0(-30.5,9.8)
  round 2.5 hole 2.4: 0(-23.9,19.8) 1(0,0)
  round 1.524 hole 0.762: 3(-30.5,9.8)
  rect 1.8x0.25 smd: A1(-32.367,1.55) A10(-32.367,6.05) A20(-32.367,11.05) A30(-32.367,16.05) A41(-28.633,16.043) A51(-28.633,11.043) A61(-28.633,6.043)
  oval 1.8x0.25 smd: A2(-32.367,2.05) A3(-32.367,2.55) A4(-32.367,3.05) A5(-32.367,3.55) A6(-32.367,4.05) A7(-32.367,4.55) A8(-32.367,5.05) A9(-32.367,5.55) A11(-32.367,6.55) A12(-32.367,7.05) A13(-32.367,7.55) A14(-32.367,8.05) A15(-32.367,8.55) A16(-32.367,9.05) A17(-32.367,9.55) A18(-32.367,10.05) A19(-32.367,10.55) A21(-32.367,11.55) A22(-32.367,12.05) A23(-32.367,12.55) A24(-32.367,13.05) A25(-32.367,13.55) A26(-32.367,14.05) A27(-32.367,14.55) A28(-32.367,15.05) A29(-32.367,15.55) A31(-32.367,16.55) A32(-32.367,17.05) A33(-32.367,17.55) A34(-32.367,18.05) A35(-32.367,18.55) A36(-28.633,18.543) A37(-28.633,18.043) A38(-28.633,17.543) A39(-28.633,17.043) A40(-28.633,16.543) A42(-28.633,15.543) A43(-28.633,15.043) A44(-28.633,14.543) A45(-28.633,14.043) A46(-28.633,13.543) A47(-28.633,13.043) A48(-28.633,12.543) A49(-28.633,12.043) A50(-28.633,11.543) A52(-28.633,10.543) A53(-28.633,10.043) A54(-28.633,9.543) A55(-28.633,9.043) A56(-28.633,8.543) A57(-28.633,8.043) A58(-28.633,7.543) A59(-28.633,7.043) A60(-28.633,6.543) A62(-28.633,5.543) A63(-28.633,5.043) A64(-28.633,4.543) A65(-28.633,4.043) A66(-28.633,3.543) A67(-28.633,3.043) A68(-28.633,2.543) A69(-28.633,2.043) A70(-28.633,1.543)
  rect 1.8x0.25 smd far side: B1(-32.367,1.55) B10(-32.367,6.05) B20(-32.367,11.05) B30(-32.367,16.05) B41(-28.633,16.043) B51(-28.633,11.043) B61(-28.633,6.043)
  oval 1.8x0.25 smd far side: B2(-32.367,2.05) B3(-32.367,2.55) B4(-32.367,3.05) B5(-32.367,3.55) B6(-32.367,4.05) B7(-32.367,4.55) B8(-32.367,5.05) B9(-32.367,5.55) B11(-32.367,6.55) B12(-32.367,7.05) B13(-32.367,7.55) B14(-32.367,8.05) B15(-32.367,8.55) B16(-32.367,9.05) B17(-32.367,9.55) B18(-32.367,10.05) B19(-32.367,10.55) B21(-32.367,11.55) B22(-32.367,12.05) B23(-32.367,12.55) B24(-32.367,13.05) B25(-32.367,13.55) B26(-32.367,14.05) B27(-32.367,14.55) B28(-32.367,15.05) B29(-32.367,15.55) B31(-32.367,16.55) B32(-32.367,17.05) B33(-32.367,17.55) B34(-32.367,18.05) B35(-32.367,18.55) B36(-28.633,18.543) B37(-28.633,18.043) B38(-28.633,17.543) B39(-28.633,17.043) B40(-28.633,16.543) B42(-28.633,15.543) B43(-28.633,15.043) B44(-28.633,14.543) B45(-28.633,14.043) B46(-28.633,13.543) B47(-28.633,13.043) B48(-28.633,12.543) B49(-28.633,12.043) B50(-28.633,11.543) B52(-28.633,10.543) B53(-28.633,10.043) B54(-28.633,9.543) B55(-28.633,9.043) B56(-28.633,8.543) B57(-28.633,8.043) B58(-28.633,7.543) B59(-28.633,7.043) B60(-28.633,6.543) B62(-28.633,5.543) B63(-28.633,5.043) B64(-28.633,4.543) B65(-28.633,4.043) B66(-28.633,3.543) B67(-28.633,3.043) B68(-28.633,2.543) B69(-28.633,2.043) B70(-28.633,1.543)
Top Overlay:
  lines w0.254: 6.731,1.524 8.89,1.524 ; 10.8,-0.508 6.731,-0.508 6.731,3.683 10.8,3.683 ; 8.89,1.524 9.906,0.508 9.906,2.54 8.89,1.524 ; -34.4,-2.4 -34.4,22 10.8,22 10.8,-2.4 -34.4,-2.4 ; -33.865,-1.495 -33.865,21.34 -25.362,21.344 ccw(c-23.9,19.8) -22.46,21.365 -9.125,21.365 -9.125,-1.495 -33.865,-1.495 ; -8.49,4.22 -8.49,21.365 9.925,21.365 9.925,4.22 -8.49,4.22

## Molex 53748-0708 [mm]
pads (70):
  rect 0.3x2 smd: 1(8.25,-1.65) 2(8.25,2.75) 3(7.75,-1.65) 4(7.75,2.75) 5(7.25,-1.65) 6(7.25,2.75) 7(6.75,-1.65) 8(6.75,2.75) 9(6.25,-1.65) 10(6.25,2.75) 11(5.75,-1.65) 12(5.75,2.75) 13(5.25,-1.65) 14(5.25,2.75) 15(4.75,-1.65) 16(4.75,2.75) 17(4.25,-1.65) 18(4.25,2.75) 19(3.75,-1.65) 20(3.75,2.75) 21(3.25,-1.65) 22(3.25,2.75) 23(2.75,-1.65) 24(2.75,2.75) 25(2.25,-1.65) 26(2.25,2.75) 27(1.75,-1.65) 28(1.75,2.75) 29(1.25,-1.65) 30(1.25,2.75) 31(0.75,-1.65) 32(0.75,2.75) 33(0.25,-1.65) 34(0.25,2.75) 35(-0.25,-1.65) 36(-0.25,2.75) 37(-0.75,-1.65) 38(-0.75,2.75) 39(-1.25,-1.65) 40(-1.25,2.75) 41(-1.75,-1.65) 42(-1.75,2.75) 43(-2.25,-1.65) 44(-2.25,2.75) 45(-2.75,-1.65) 46(-2.75,2.75) 47(-3.25,-1.65) 48(-3.25,2.75) 49(-3.75,-1.65) 50(-3.75,2.75) 51(-4.25,-1.65) 52(-4.25,2.75) 53(-4.75,-1.65) 54(-4.75,2.75) 55(-5.25,-1.65) 56(-5.25,2.75) 57(-5.75,-1.65) 58(-5.75,2.75) 59(-6.25,-1.65) 60(-6.25,2.75) 61(-6.75,-1.65) 62(-6.75,2.75) 63(-7.25,-1.65) 64(-7.25,2.75) 65(-7.75,-1.65) 66(-7.75,2.75) 67(-8.25,-1.65) 68(-8.25,2.75) 69(-8.75,-1.65) 70(-8.75,2.75)
Top Overlay:
  lines w0.2: -9.1,0.55 8.6,0.55 ; -0.25,-1 -0.25,2 ; -10.9,-1.55 -9.1,-1.55 8.6,-1.55 10.4,-1.55 10.4,2.65 8.6,2.65 -9.1,2.65 -10.9,2.65 -10.9,-1.55 ; -9.1,-1 -9.1,0 -9.1,2 8.6,2 8.6,-1 -9.1,-1
3D body "537480708.stp": height 2.2, standoff -0.22, extent -10.9,-1.6 10.4,2.7